# Altium schematic symbol library EVT_SYS_CARRIER.SchLib: 22 symbols
Pins are listed as number, name and electrical type; pins without a type are passive.

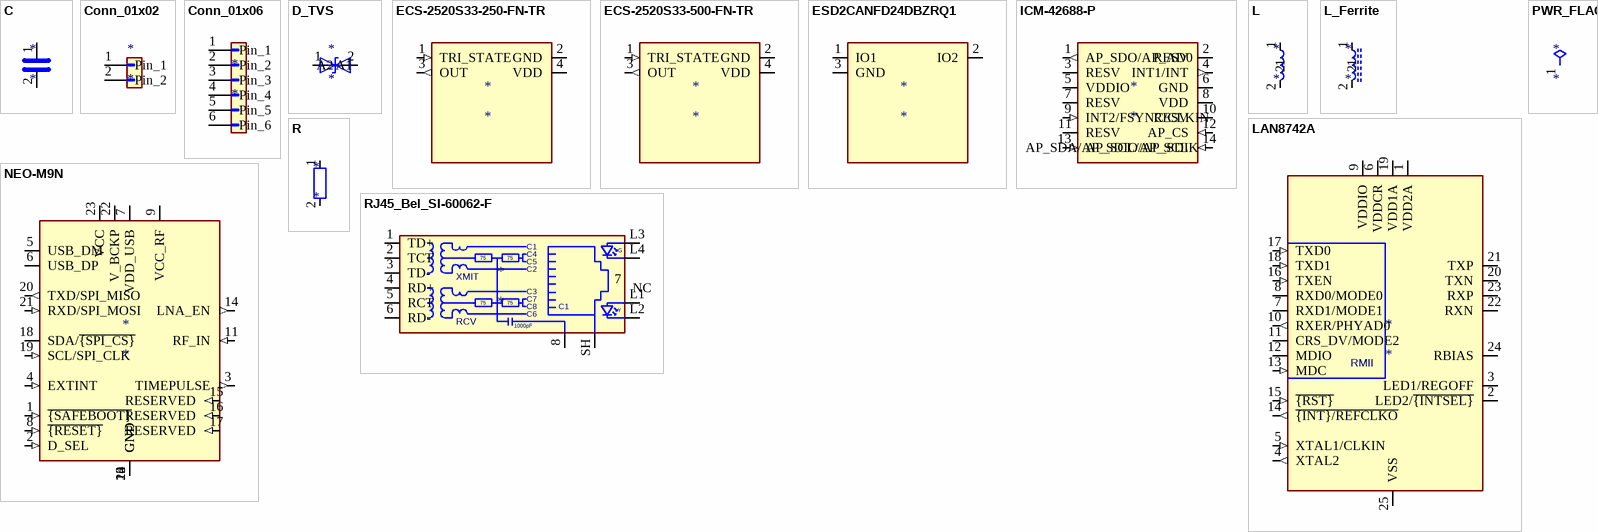
[diagram p0: symbols C to RJ45_Bel_SI-60062-F]

## C
designator *
pins: 1, 2

## Conn_01x02
designator *
pins: 1 Pin_1, 2 Pin_2

## Conn_01x06
designator *
pins: 1 Pin_1, 2 Pin_2, 3 Pin_3, 4 Pin_4, 5 Pin_5, 6 Pin_6

## D_TVS
designator *
pins: 1 A1, 2 A2

## ECS-2520S33-250-FN-TR
designator *
pins: 1 TRI_STATE (in), 2 GND (power), 3 OUT (out), 4 VDD (power)

## ECS-2520S33-500-FN-TR
designator *
pins: 1 TRI_STATE (in), 2 GND (power), 3 OUT (out), 4 VDD (power)

## ESD2CANFD24DBZRQ1
designator *
pins: 1 IO1 (io), 2 IO2 (io), 3 GND

## ICM-42688-P
designator *
pins: 1 AP_SDO/AP_AD0 (out), 2 RESV, 3 RESV, 4 INT1/INT (out), 5 VDDIO (power), 6 GND (power), 7 RESV, 8 VDD (power), 9 INT2/FSYNC/CLKIN (in), 10 RESV, 11 RESV, 12 AP_CS (in), 13 AP_SCL/AP_SCLK (in), 14 AP_SDA/AP_SDIO/AP_SDI (in)

## L
designator *
pins: 1, 2

## L_Ferrite
designator *
pins: 1, 2

## LAN8742A
designator *
pins: 1 VDD2A (power), 2 LED2/~{{INTSEL}} (io), 3 LED1/REGOFF (io), 4 XTAL2 (out), 5 XTAL1/CLKIN (in), 6 VDDCR (power), 7 RXD1/MODE1 (io), 8 RXD0/MODE0 (io), 9 VDDIO (power), 10 RXER/PHYAD0 (out), 11 CRS_DV/MODE2 (io), 12 MDIO (io), 13 MDC (in), 14 ~{{INT}/REFCLKO} (out), 15 ~{{RST}} (in), 16 TXEN (in), 17 TXD0 (in), 18 TXD1 (in), 19 VDD1A (power), 20 TXN, 21 TXP, 22 RXN, 23 RXP, 24 RBIAS, 25 VSS (power)
text: RMII

## NEO-M9N
designator *
pins: 1 ~{{SAFEBOOT}} (in), 2 D_SEL (in), 3 TIMEPULSE (out), 4 EXTINT (in), 5 USB_DM (io), 6 USB_DP (io), 7 VDD_USB (power), 8 ~{{RESET}} (in), 9 VCC_RF (power), 10 GND (power), 11 RF_IN (in), 12 GND, 13 GND, 14 LNA_EN (out), 15 RESERVED (in), 16 RESERVED (in), 17 RESERVED (in), 18 SDA/~{{SPI_CS}} (io), 19 SCL/SPI_CLK (in), 20 TXD/SPI_MISO (out), 21 RXD/SPI_MOSI (in), 22 V_BCKP (power), 23 VCC (power), 24 GND

## PWR_FLAG
designator *  (graphical)
pins: 1 (power)

## R
designator *
pins: 1, 2

## RJ45_Bel_SI-60062-F
designator *
pins: 1 TD+, 2 TCT, 3 TD-, 4 RD+, 5 RCT, 6 RD-, 7 NC (in), 8 (power), L1, L2, L3, L4, SH
text: C1; G; 75; C4; C5; XMIT; C2; C3; C8; C7; Y; RCV; C6; 1000pF

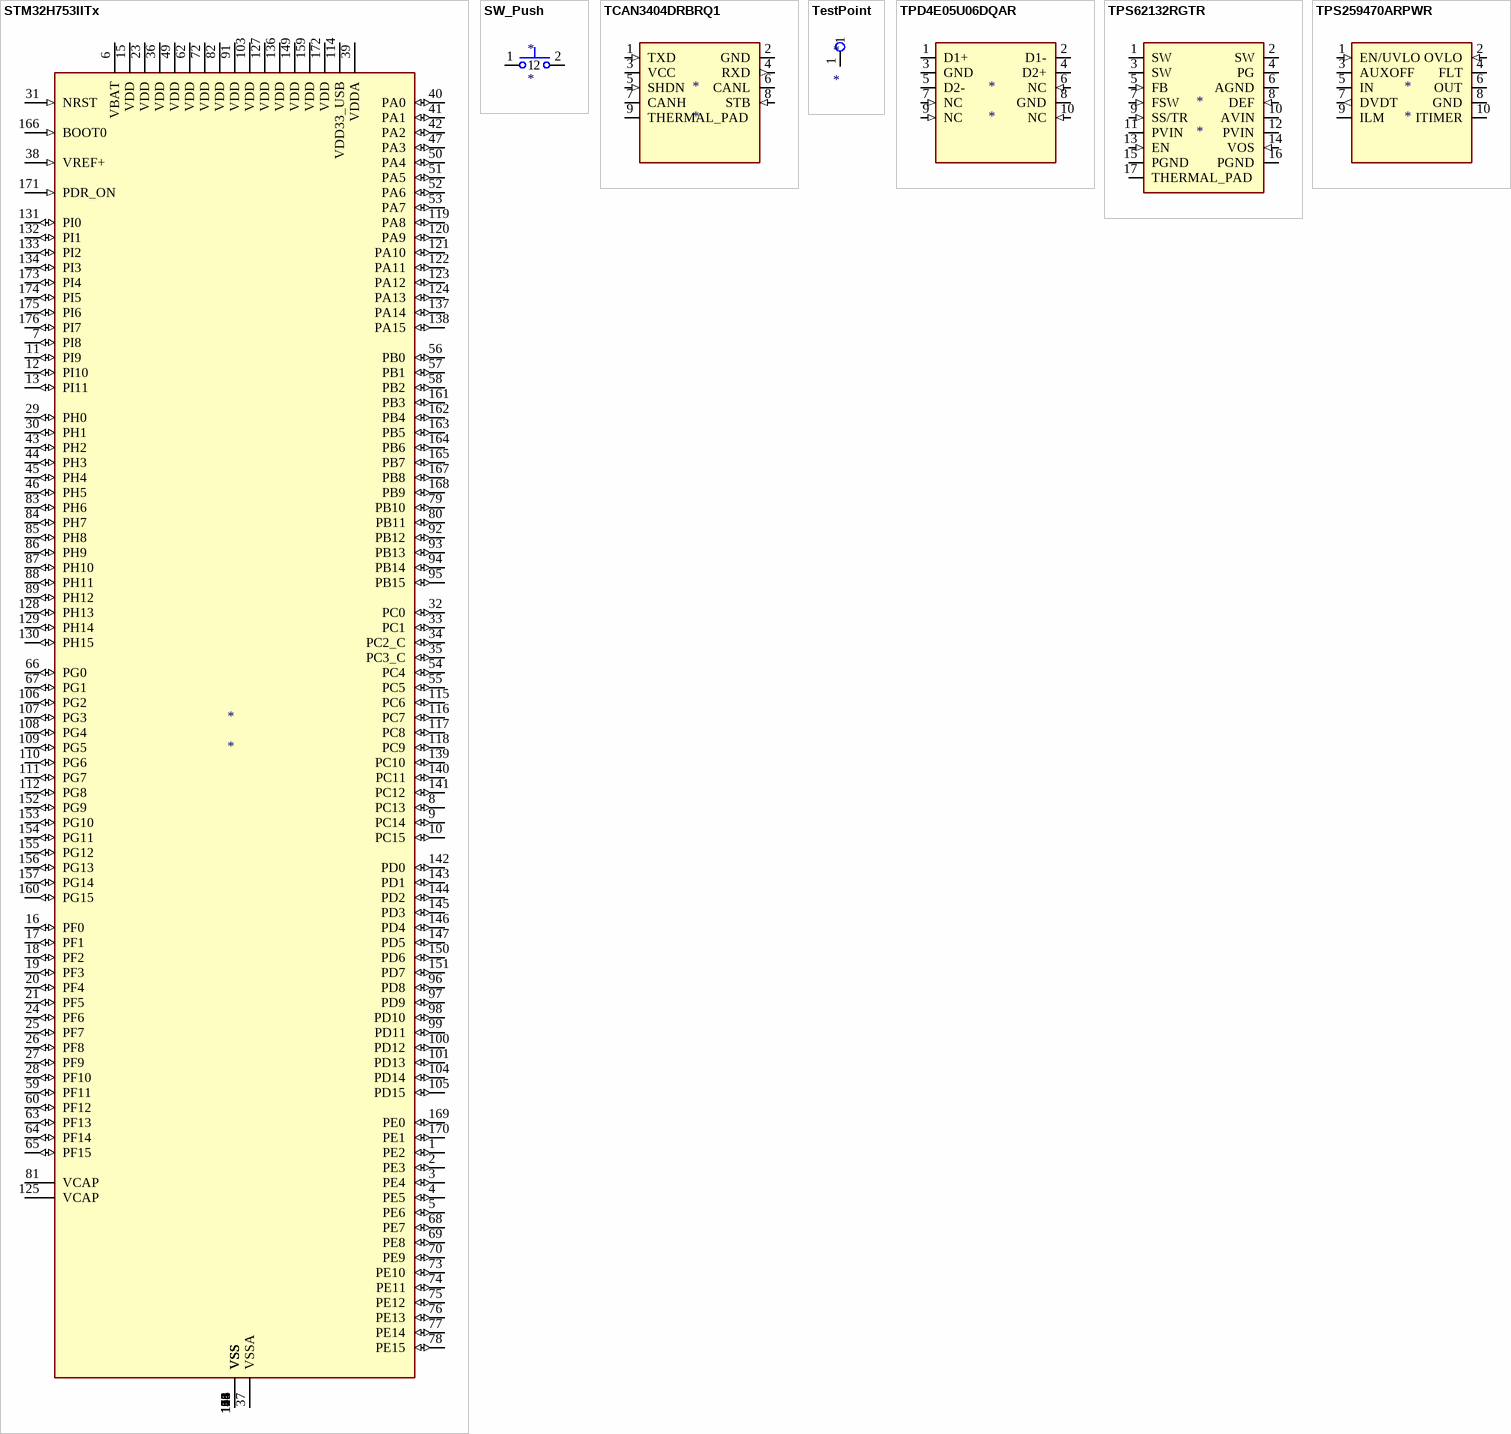
[diagram p1: symbols STM32H753IITx to TPS259470ARPWR]

## STM32H753IITx
designator *
pins: 1 PE2 (io), 2 PE3 (io), 3 PE4 (io), 4 PE5 (io), 5 PE6 (io), 6 VBAT (power), 7 PI8 (io), 8 PC13 (io), 9 PC14 (io), 10 PC15 (io), 11 PI9 (io), 12 PI10 (io), 13 PI11 (io), 14 VSS (power), 15 VDD (power), 16 PF0 (io), 17 PF1 (io), 18 PF2 (io), 19 PF3 (io), 20 PF4 (io), 21 PF5 (io), 22 VSS, 23 VDD (power), 24 PF6 (io), 25 PF7 (io), 26 PF8 (io), 27 PF9 (io), 28 PF10 (io), 29 PH0 (io), 30 PH1 (io), 31 NRST (in), 32 PC0 (io), 33 PC1 (io), 34 PC2_C (io), 35 PC3_C (io), 36 VDD (power), 37 VSSA (power), 38 VREF+ (in), 39 VDDA (power), 40 PA0 (io), 41 PA1 (io), 42 PA2 (io), 43 PH2 (io), 44 PH3 (io), 45 PH4 (io), 46 PH5 (io), 47 PA3 (io), 48 VSS, 49 VDD (power), 50 PA4 (io), 51 PA5 (io), 52 PA6 (io), 53 PA7 (io), 54 PC4 (io), 55 PC5 (io), 56 PB0 (io), 57 PB1 (io), 58 PB2 (io), 59 PF11 (io), 60 PF12 (io), 61 VSS, 62 VDD (power), 63 PF13 (io), 64 PF14 (io), 65 PF15 (io), 66 PG0 (io), 67 PG1 (io), 68 PE7 (io), 69 PE8 (io), 70 PE9 (io), 71 VSS, 72 VDD (power), 73 PE10 (io), 74 PE11 (io), 75 PE12 (io), 76 PE13 (io), 77 PE14 (io), 78 PE15 (io), 79 PB10 (io), 80 PB11 (io), 81 VCAP (power), 82 VDD (power), 83 PH6 (io), 84 PH7 (io), 85 PH8 (io), 86 PH9 (io), 87 PH10 (io), 88 PH11 (io), 89 PH12 (io), 90 VSS, 91 VDD (power), 92 PB12 (io), 93 PB13 (io), 94 PB14 (io), 95 PB15 (io), 96 PD8 (io), 97 PD9 (io), 98 PD10 (io), 99 PD11 (io), 100 PD12 (io), 101 PD13 (io), 102 VSS, 103 VDD (power), 104 PD14 (io), 105 PD15 (io), 106 PG2 (io), 107 PG3 (io), 108 PG4 (io), 109 PG5 (io), 110 PG6 (io), 111 PG7 (io), 112 PG8 (io), 113 VSS, 114 VDD33_USB (power), 115 PC6 (io), 116 PC7 (io), 117 PC8 (io), 118 PC9 (io), 119 PA8 (io), 120 PA9 (io), 121 PA10 (io), 122 PA11 (io), 123 PA12 (io), 124 PA13 (io), 125 VCAP (power), 126 VSS, 127 VDD (power), 128 PH13 (io), 129 PH14 (io), 130 PH15 (io), 131 PI0 (io), 132 PI1 (io), 133 PI2 (io), 134 PI3 (io), 135 VSS, 136 VDD (power), 137 PA14 (io), 138 PA15 (io), 139 PC10 (io), 140 PC11 (io), 141 PC12 (io), 142 PD0 (io), 143 PD1 (io), 144 PD2 (io), 145 PD3 (io), 146 PD4 (io), 147 PD5 (io), 148 VSS, 149 VDD (power), 150 PD6 (io), 151 PD7 (io), 152 PG9 (io), 153 PG10 (io), 154 PG11 (io), 155 PG12 (io), 156 PG13 (io), 157 PG14 (io), 158 VSS, 159 VDD (power), 160 PG15 (io), 161 PB3 (io), 162 PB4 (io), 163 PB5 (io), 164 PB6 (io), 165 PB7 (io), 166 BOOT0 (in), 167 PB8 (io), 168 PB9 (io), 169 PE0 (io), 170 PE1 (io), 171 PDR_ON (in), 172 VDD (power), 173 PI4 (io), 174 PI5 (io), 175 PI6 (io), 176 PI7 (io)

## SW_Push
designator *
pins: 1, 2

## TCAN3404DRBRQ1
designator *
pins: 1 TXD (in), 2 GND (power), 3 VCC (power), 4 RXD (out), 5 SHDN (in), 6 CANL (io), 7 CANH (io), 8 STB (in), 9 THERMAL_PAD (power)

## TestPoint
designator *
pins: 1

## TPD4E05U06DQAR
designator *
pins: 1 D1+ (io), 2 D1- (io), 3 GND, 4 D2+ (io), 5 D2- (io), 6 NC (in), 7 NC (in), 8 GND, 9 NC (in), 10 NC (in)

## TPS62132RGTR
designator *
pins: 1 SW, 2 SW, 3 SW, 4 PG (oc), 5 FB (in), 6 AGND (power), 7 FSW (in), 8 DEF (in), 9 SS/TR (in), 10 AVIN (power), 11 PVIN (power), 12 PVIN (power), 13 EN (in), 14 VOS (in), 15 PGND (power), 16 PGND (power), 17 THERMAL_PAD (power)

## TPS259470ARPWR
designator *
pins: 1 EN/UVLO (in), 2 OVLO (in), 3 AUXOFF (oc), 4 FLT (oc), 5 IN (power), 6 OUT (power), 7 DVDT (out), 8 GND (power), 9 ILM (io), 10 ITIMER (io)